# EAGLE library part SUPERMINI (library C3_SCOUT_REVC)
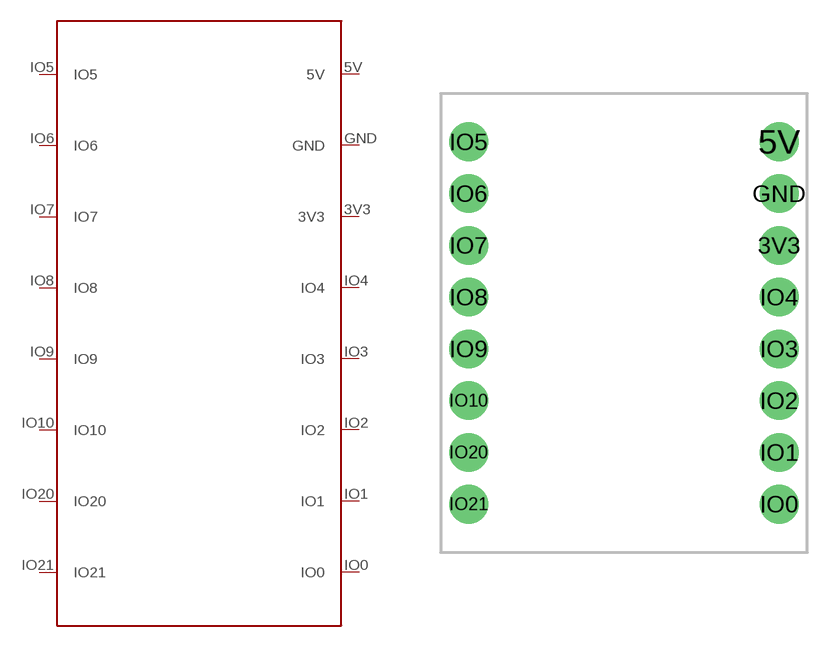
[diagram p5: symbol with the pads of SUPERMINI-2X8-15.24; footprint SUPERMINI-2X8-15.24]

Designator prefix U

## SUPERMINI  [SUPERMINI-2X8-15.24]
3V3  3V3  out
5V  5V  pwr
GND  GND  pwr
IO0  IO0
IO1  IO1
IO2  IO2
IO3  IO3
IO4  IO4
IO5  IO5
IO6  IO6
IO7  IO7
IO8  IO8
IO9  IO9
IO10  IO10
IO20  IO20
IO21  IO21

## Footprint SUPERMINI-2X8-15.24 (pad centres in mm)
drill 1.05 pad 1.9: 3V3 7.62,3.81; 5V 7.62,8.89; GND 7.62,6.35; IO0 7.62,-8.89; IO1 7.62,-6.35; IO2 7.62,-3.81; IO3 7.62,-1.27; IO4 7.62,1.27; IO5 -7.62,8.89; IO6 -7.62,6.35; IO7 -7.62,3.81; IO8 -7.62,1.27; IO9 -7.62,-1.27; IO10 -7.62,-3.81; IO20 -7.62,-6.35; IO21 -7.62,-8.89